# Altium schematic symbol library SS34_DO-214AC.SchLib: 1 symbol
Pins are listed as number, name and electrical type; pins without a type are passive.

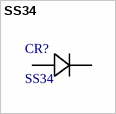
[diagram p0: symbol SS34]

## SS34
designator CR?
Description; Manufacturer_Name: Microdiode Electronics; Copyright: Copyright (C) 2026 Ultra Librarian. All rights reserved.; Manufacturer_Part_Number: SS34
footprint DO-214ACSMA2_MDD
pins: 1, 2